# Altium footprint library 三代电容_power.PcbLib: 12 footprints
Each footprint in its own frame and in the unit in brackets; x right, y up, seen from the top. Pads: shape width x height; smd on the part's side, far side on the other; paste and mask are expansions set on the pad; w line width, h text height; cw(c..) or ccw(c..) is an arc to the next point about the centre after c.
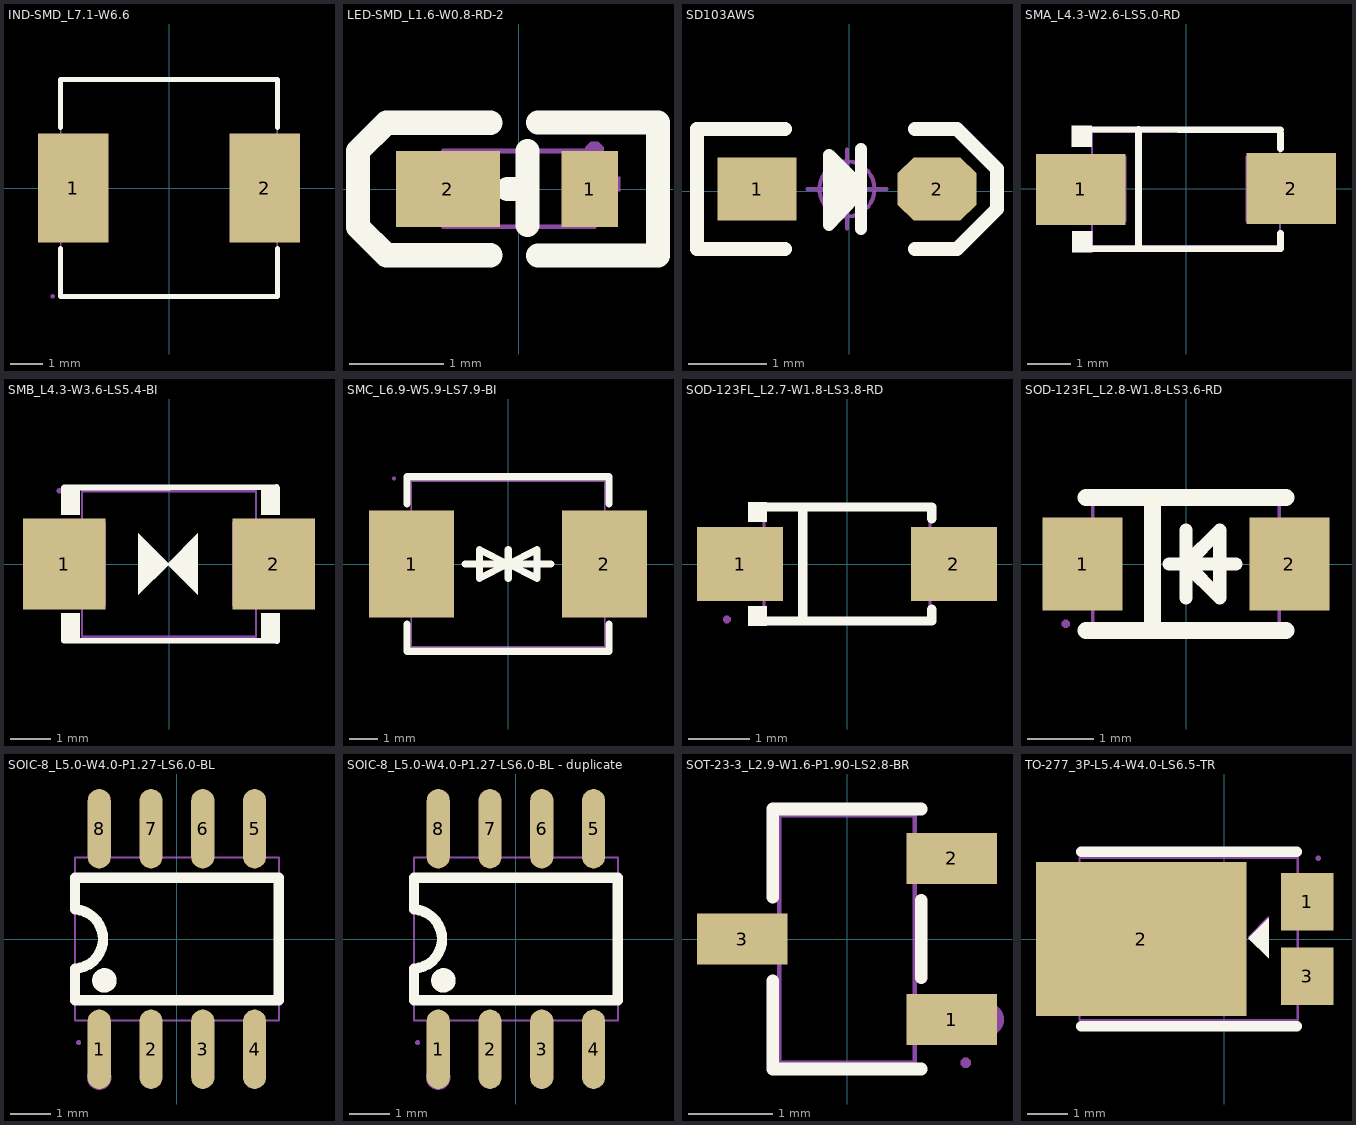
[diagram p0: the footprints below, top view; thin cyan lines are the x and y axes]

## IND-SMD_L7.1-W6.6 [mm]
pads (2):
  rect 2.15x3.32 smd: 1(-2.913,0) 2(2.913,0)
Top Overlay:
  lines w0.152: -3.302,-1.84 -3.302,-3.302 3.302,-3.302 3.302,-1.84 ; -3.302,1.84 -3.302,3.302 3.302,3.302 3.302,1.84
Mechanical 15:
  region: 1.95,1.5 3.55,1.5 3.55,-1.5 1.95,-1.5
  region: -3.55,1.5 -1.95,1.5 -1.95,-1.5 -3.55,-1.5
  region: -3.49,-3.3 -3.49,-3.275 -3.525,-3.24 -3.575,-3.24 -3.61,-3.275 -3.61,-3.3 -3.61,-3.325 -3.575,-3.36 -3.525,-3.36 -3.49,-3.325 -3.49,-3.3
  lines w0.051: -3.3,-3.3 -3.3,3.3 3.3,3.3 3.3,-3.3 -3.3,-3.3

## LED-SMD_L1.6-W0.8-RD-2 [mm]
pads (2):
  rect 0.6x0.8 smd: 1(0.75,0)
  rect 1.1x0.8 smd: 2(-0.75,0)
Top Overlay:
  lines w0.254: -0.3,-0.7 -1.4,-0.7 -1.7,-0.4 -1.7,0.4 -1.4,0.7 -0.3,0.7 ; -0.119,0 0.09,0.002 ; 0.09,-0.38 0.09,0.4 ; 0.201,-0.701 1.471,-0.701 1.471,0.701 0.201,0.701
Mechanical 6:
  region: -1.026,0.144 -0.418,0.144 -0.418,-0.01 -1.029,-0.01 -1.029,-0.003
  region: 0.462,0.132 1.07,0.132 1.07,-0.022 0.459,-0.022 0.459,-0.015
  region: 0.692,-0.264 0.692,0.345 0.845,0.345 0.845,-0.266 0.839,-0.266
Mechanical 15:
  region: 0.9,0.4 0.9,0.359 0.841,0.3 0.758,0.3 0.7,0.359 0.7,0.4 0.7,0.441 0.758,0.5 0.841,0.5 0.9,0.441
  region: 0.8,0.35 0.8,-0.35 0.5,-0.35 0.5,0.35
  region: -0.8,-0.35 -0.8,0.35 -0.5,0.35 -0.5,-0.35
  lines w0.051: -0.8,-0.4 0.8,-0.4 0.8,0.4 -0.8,0.4 -0.8,-0.4

## SD103AWS [mm]
pads (2):
  rect 1x0.8 smd: 1(-1.168,0.025)
  oct 1x0.8 smd: 2(1.118,0.025)
Top Overlay:
  lines w0.152: 0.152,-0.483 0.152,0.533 ; 0.152,0 -0.254,-0.432 -0.254,0.457 0.152,0.051
  lines w0.178: -0.813,-0.737 -1.93,-0.737 -1.93,0.787 -0.813,0.787 ; 0.838,-0.737 1.372,-0.737 1.88,-0.229 1.88,0.279 1.372,0.787 0.838,0.787
  lines w0.254: -0.152,0.279 -0.178,-0.152 0,0 -0.051,0.152
Mechanical 15:
  circle w0.05: c-0.025,0.025 r0.35
  lines w0.05: -0.525,0.025 0.475,0.025 ; -0.025,-0.475 -0.025,0.525
3D body "SOD-323.STEP": height 1, standoff 0.04, extent -1.362,-0.606 1.286,0.694

## SMA_L4.3-W2.6-LS5.0-RD [mm]
pads (2):
  rect 2.046x1.62 smd: 1(-2.404,-0.009) 2(2.404,0.009)
Top Overlay:
  region: -2.145,-1.44 -2.145,-0.962 -2.602,-0.962 -2.602,-1.44
  region: -2.158,1.44 -2.158,0.962 -2.615,0.962 -2.615,1.44
  lines w0.152: -2.526,1.364 2.159,1.346 ; -2.504,-1.364 2.165,-1.364 ; -1.085,-1.364 -1.085,1.364 ; 2.159,-1.364 2.159,-1.013 ; 2.159,0.919 2.159,1.27
Mechanical 6:
  region: 2.142,-0.644 2.142,0.644 1.949,0.644 1.949,-0.644
  region: 2.432,-0.097 2.432,0.097 1.659,0.097 1.659,-0.097
  region: -2.432,-0.097 -2.432,0.097 -1.659,0.097 -1.659,-0.097
Mechanical 15:
  region: -2.5,0.75 -2.5,-0.75 -1.36,-0.75 -1.36,0.75
  region: 2.5,-0.75 2.5,0.75 1.36,0.75 1.36,-0.75
  region: -2.44,-1.3 -2.44,-1.325 -2.475,-1.36 -2.525,-1.36 -2.56,-1.325 -2.56,-1.3 -2.56,-1.275 -2.525,-1.24 -2.475,-1.24 -2.44,-1.275 -2.44,-1.3
  lines w0.051: -2.15,-1.3 2.15,-1.3 2.15,1.3 -2.15,1.3 -2.15,-1.3

## SMB_L4.3-W3.6-LS5.4-BI [mm]
pads (2):
  rect 2.047x2.241 smd: 1(-2.591,0) 2(2.591,0)
Top Overlay:
  region: -0.045,-0.004 0.717,-0.766 0.717,0.758
  region: 0,0 -0.762,0.762 -0.762,-0.762
  region: 2.286,-1.905 2.286,-1.215 2.743,-1.215 2.743,-1.905
  region: 2.286,1.905 2.286,1.215 2.743,1.215 2.743,1.905
  region: -2.667,1.905 -2.667,1.215 -2.21,1.215 -2.21,1.905
  region: -2.667,-1.905 -2.667,-1.215 -2.21,-1.215 -2.21,-1.905
  lines w0.152: -2.599,-1.89 2.667,-1.905 ; -2.591,1.887 2.663,1.905
Mechanical 15:
  region: 2.708,1.037 2.708,-1.037 1.568,-1.037 1.568,1.037
  region: -2.708,1.037 -2.708,-1.037 -1.568,-1.037 -1.568,1.037
  region: -2.659,1.816 -2.659,1.791 -2.694,1.756 -2.744,1.756 -2.779,1.791 -2.779,1.816 -2.779,1.841 -2.744,1.876 -2.694,1.876 -2.659,1.841 -2.659,1.816
  lines w0.051: -2.15,-1.8 2.15,-1.8 2.15,1.8 -2.15,1.8 -2.15,-1.8

## SMC_L6.9-W5.9-LS7.9-BI [mm]
pads (2):
  rect 3.03x3.82 smd: 1(-3.435,0) 2(3.435,0)
Top Overlay:
  lines w0.254: -3.6,-2.141 -3.6,-3.11 3.6,-3.11 3.6,-2.141 ; -3.6,2.141 -3.6,3.11 3.6,3.11 3.6,2.141 ; -1.524,0 0.508,0 ; -0.496,0 1.536,0 ; 0,-0.508 0,0.508 0,0 ; 0.012,0.508 0.012,-0.508 0.012,0 ; 0,0 -1.016,0.508 -1.016,-0.508 0,0 ; 0.012,0 1.028,0.508 1.028,-0.508 0.012,0
Mechanical 15:
  region: 2.812,1.525 3.952,1.525 3.952,-1.525 2.812,-1.525
  region: -3.949,1.525 -2.809,1.525 -2.809,-1.525 -3.949,-1.525
  region: -4.004,3.048 -4.004,3.023 -4.039,2.988 -4.089,2.988 -4.124,3.023 -4.124,3.048 -4.124,3.073 -4.089,3.108 -4.039,3.108 -4.004,3.073 -4.004,3.048
  lines w0.051: -3.45,-2.95 -3.45,2.95 3.45,2.95 3.45,-2.95 -3.45,-2.95

## SOD-123FL_L2.7-W1.8-LS3.8-RD [mm]
pads (2):
  rect 1.4x1.2 smd: 1(-1.735,0) 2(1.735,0)
Top Overlay:
  region: -1.3,-1.002 -1.3,-0.682 -1.605,-0.682 -1.605,-1.002
  region: -1.3,1.002 -1.3,0.682 -1.605,0.682 -1.605,1.002
  lines w0.152: -1.376,-0.926 1.376,-0.926 1.376,-0.733 ; -1.376,0.926 1.376,0.926 1.376,0.733 ; -0.717,-0.876 -0.717,0.876
Mechanical 6:
  region: 1.747,-0.384 1.555,-0.384 1.555,0.384 1.747,0.384
  region: 2.035,0.096 2.035,-0.096 1.267,-0.096 1.267,0.096
  region: -2.032,0.127 -2.032,-0.065 -1.264,-0.065 -1.264,0.127
Mechanical 15:
  region: -1.95,0.475 -1.15,0.475 -1.15,-0.475 -1.95,-0.475
  region: 1.95,-0.475 1.15,-0.475 1.15,0.475 1.95,0.475
  region: -1.89,-0.9 -1.89,-0.925 -1.925,-0.96 -1.975,-0.96 -2.01,-0.925 -2.01,-0.9 -2.01,-0.875 -1.975,-0.84 -1.925,-0.84 -1.89,-0.875 -1.89,-0.9
  lines w0.051: -1.35,-0.9 1.35,-0.9 1.35,0.9 -1.35,0.9 -1.35,-0.9

## SOD-123FL_L2.8-W1.8-LS3.6-RD [mm]
pads (2):
  rect 1.2x1.4 smd: 1(-1.55,0) 2(1.55,0)
Top Overlay:
  lines w0.2: -0.254,0 0.746,0 ; 0,-0.508 0,0.508 ; 0,0 0.508,0.508 0.508,-0.508 0,0
  lines w0.254: -1.5,-1 1.5,-1 ; -1.5,1 1.5,1 ; -0.506,-1 -0.506,1
Mechanical 6:
  region: 1.175,0.075 1.475,0.075 1.475,0.375 1.625,0.375 1.625,0.125 1.625,0.075 1.675,0.075 1.925,0.075 1.925,-0.075 1.625,-0.075 1.625,-0.375 1.475,-0.375 1.475,-0.075 1.175,-0.075
  region: -1.875,0.075 -1.175,0.075 -1.175,-0.075 -1.925,-0.075 -1.925,0.075
Mechanical 15:
  region: -1.743,-0.9 -1.743,-0.925 -1.778,-0.96 -1.828,-0.96 -1.863,-0.925 -1.863,-0.9 -1.863,-0.875 -1.828,-0.84 -1.778,-0.84 -1.743,-0.875 -1.743,-0.9
  region: -1.803,0.425 -1.103,0.425 -1.103,-0.425 -1.803,-0.425
  region: 1.103,0.425 1.803,0.425 1.803,-0.425 1.103,-0.425
  lines w0.051: -1.4,-0.9 -1.4,0.9 1.4,0.9 1.4,-0.9 -1.4,-0.9

## SOIC-8_L5.0-W4.0-P1.27-LS6.0-BL [mil]
pads (8):
  oval 22.38x76.78 smd: 1(-75,-106.5) 2(-25,-106.5) 3(25,-106.5) 4(75,-106.5) 5(75,106.5) 6(25,106.5) 7(-25,106.5) 8(-75,106.5)
Top Overlay:
  circle w11.81: c-70,-40 r5.91
  lines w10: -98.43,-28.61 ccw(c-99.99,0) -98.23,28.59 ; -98.42,-28.61 -98.42,-59.05 98.42,-59.05 98.42,59.05 -98.42,59.05 -98.42,28.59
Mechanical 6:
  circle w11.81: c-75,-133.86 r5.91
Mechanical 15:
  region: -83.07,-118.11 -83.07,-85.24 -66.93,-85.24 -66.93,-118.11
  region: -83.07,-85.63 -83.07,-76.38 -66.93,-76.38 -66.93,-85.63
  region: -33.07,-118.11 -33.07,-85.24 -16.93,-85.24 -16.93,-118.11
  region: -33.07,-85.63 -33.07,-76.38 -16.93,-76.38 -16.93,-85.63
  region: 16.93,-118.11 16.93,-85.24 33.07,-85.24 33.07,-118.11
  region: 16.93,-85.63 16.93,-76.38 33.07,-76.38 33.07,-85.63
  region: 66.93,-118.11 66.93,-85.24 83.07,-85.24 83.07,-118.11
  region: 66.93,-85.63 66.93,-76.38 83.07,-76.38 83.07,-85.63
  region: -83.07,85.24 -83.07,118.11 -66.93,118.11 -66.93,85.24
  region: -83.07,76.38 -83.07,85.63 -66.93,85.63 -66.93,76.38
  region: -33.07,85.24 -33.07,118.11 -16.93,118.11 -16.93,85.24
  region: -33.07,76.38 -33.07,85.63 -16.93,85.63 -16.93,76.38
  region: 16.93,85.24 16.93,118.11 33.07,118.11 33.07,85.24
  region: 16.93,76.38 16.93,85.63 33.07,85.63 33.07,76.38
  region: 66.93,85.24 66.93,118.11 83.07,118.11 83.07,85.24
  region: 66.93,76.38 66.93,85.63 83.07,85.63 83.07,76.38
  region: -92.64,-100 -92.64,-99.02 -94.02,-97.64 -95.98,-97.64 -97.36,-99.02 -97.36,-100 -97.36,-100.98 -95.98,-102.36 -94.02,-102.36 -92.64,-100.98
  lines w2: -98.42,-78.74 98.42,-78.74 98.42,78.74 -98.42,78.74 -98.42,-78.74

## SOIC-8_L5.0-W4.0-P1.27-LS6.0-BL - duplicate [mil]
pads (8):
  oval 22.38x76.78 smd: 1(-75,-106.5) 2(-25,-106.5) 3(25,-106.5) 4(75,-106.5) 5(75,106.5) 6(25,106.5) 7(-25,106.5) 8(-75,106.5)
Top Overlay:
  circle w11.81: c-70,-40 r5.91
  lines w10: -98.43,-28.61 ccw(c-99.99,0) -98.23,28.59 ; -98.42,-28.61 -98.42,-59.05 98.42,-59.05 98.42,59.05 -98.42,59.05 -98.42,28.59
Mechanical 6:
  circle w11.81: c-75,-133.86 r5.91
Mechanical 15:
  region: -92.64,-100 -92.64,-100.98 -94.02,-102.36 -95.98,-102.36 -97.36,-100.98 -97.36,-100 -97.36,-99.02 -95.98,-97.64 -94.02,-97.64 -92.64,-99.02 -92.64,-100
  region: 66.93,76.38 66.93,85.63 83.07,85.63 83.07,76.38
  region: 66.93,85.24 66.93,118.11 83.07,118.11 83.07,85.24
  region: 16.93,76.38 16.93,85.63 33.07,85.63 33.07,76.38
  region: 16.93,85.24 16.93,118.11 33.07,118.11 33.07,85.24
  region: -33.07,76.38 -33.07,85.63 -16.93,85.63 -16.93,76.38
  region: -33.07,85.24 -33.07,118.11 -16.93,118.11 -16.93,85.24
  region: -83.07,76.38 -83.07,85.63 -66.93,85.63 -66.93,76.38
  region: -83.07,85.24 -83.07,118.11 -66.93,118.11 -66.93,85.24
  region: 66.93,-85.63 66.93,-76.38 83.07,-76.38 83.07,-85.63
  region: 66.93,-118.11 66.93,-85.24 83.07,-85.24 83.07,-118.11
  region: 16.93,-85.63 16.93,-76.38 33.07,-76.38 33.07,-85.63
  region: 16.93,-118.11 16.93,-85.24 33.07,-85.24 33.07,-118.11
  region: -33.07,-85.63 -33.07,-76.38 -16.93,-76.38 -16.93,-85.63
  region: -33.07,-118.11 -33.07,-85.24 -16.93,-85.24 -16.93,-118.11
  region: -83.07,-85.63 -83.07,-76.38 -66.93,-76.38 -66.93,-85.63
  region: -83.07,-118.11 -83.07,-85.24 -66.93,-85.24 -66.93,-118.11
  lines w2: -98.42,-78.74 -98.42,78.74 98.42,78.74 98.42,-78.74 -98.42,-78.74

## SOT-23-3_L2.9-W1.6-P1.90-LS2.8-BR [mm]
pads (3):
  rect 1.07x0.6 smd: 1(1.235,-0.95) 2(1.235,0.95) 3(-1.235,0)
Top Overlay:
  lines w0.152: -0.876,-0.495 -0.876,-1.536 0.876,-1.536 ; -0.876,0.495 -0.876,1.536 0.876,1.536 ; 0.876,-0.455 0.876,0.455
Mechanical 6:
  circle w0.2: c1.651,-0.95 r0.1
Mechanical 15:
  region: -0.96,-0.2 -0.96,0.2 -0.79,0.2 -0.79,-0.2
  region: -0.95,-0.2 -0.95,0.2 -1.4,0.2 -1.4,-0.2
  region: 0.79,0.75 0.79,1.15 0.96,1.15 0.96,0.75
  region: 0.95,0.75 0.95,1.15 1.4,1.15 1.4,0.75
  region: 0.79,-1.15 0.79,-0.75 0.96,-0.75 0.96,-1.15
  region: 0.95,-1.15 0.95,-0.75 1.4,-0.75 1.4,-1.15
  region: 1.46,-1.46 1.46,-1.485 1.425,-1.52 1.375,-1.52 1.34,-1.485 1.34,-1.46 1.34,-1.435 1.375,-1.4 1.425,-1.4 1.46,-1.435 1.46,-1.46
  lines w0.051: -0.8,-1.46 0.8,-1.46 0.8,1.46 -0.8,1.46 -0.8,-1.46

## TO-277_3P-L5.4-W4.0-LS6.5-TR [mm]
pads (3):
  rect 1.29x1.422 smd: 1(2.054,0.92) 3(2.054,-0.92)
  rect 5.2x3.8 smd: 2(-2.054,0)
Top Overlay:
  region: 0.599,0.02 1.099,0.52 1.099,-0.48
  lines w0.254: -3.537,-2.159 1.797,-2.159 ; -3.537,2.159 1.797,2.159
Mechanical 6:
  region: 0.589,0.06 1.089,0.56 1.089,-0.44
Mechanical 15:
  region: 2.387,2 2.387,2.025 2.352,2.06 2.302,2.06 2.267,2.025 2.267,2 2.267,1.975 2.302,1.94 2.352,1.94 2.387,1.975 2.387,2
  region: -3.401,-0.86 -4.221,-0.86 -4.221,0.94 -3.401,0.94 -3.401,1.6 0.179,1.6 0.179,-1.48 -3.401,-1.48
  region: 1.777,-0.47 2.327,-0.47 2.327,-1.37 1.777,-1.37
  region: 1.777,1.37 2.327,1.37 2.327,0.47 1.777,0.47
  lines w0.051: -3.581,-2 -3.581,2 1.819,2 1.819,-2 -3.581,-2